# Altium schematic symbol library Capacitors.SchLib: 265 symbols (part 4 of 4)
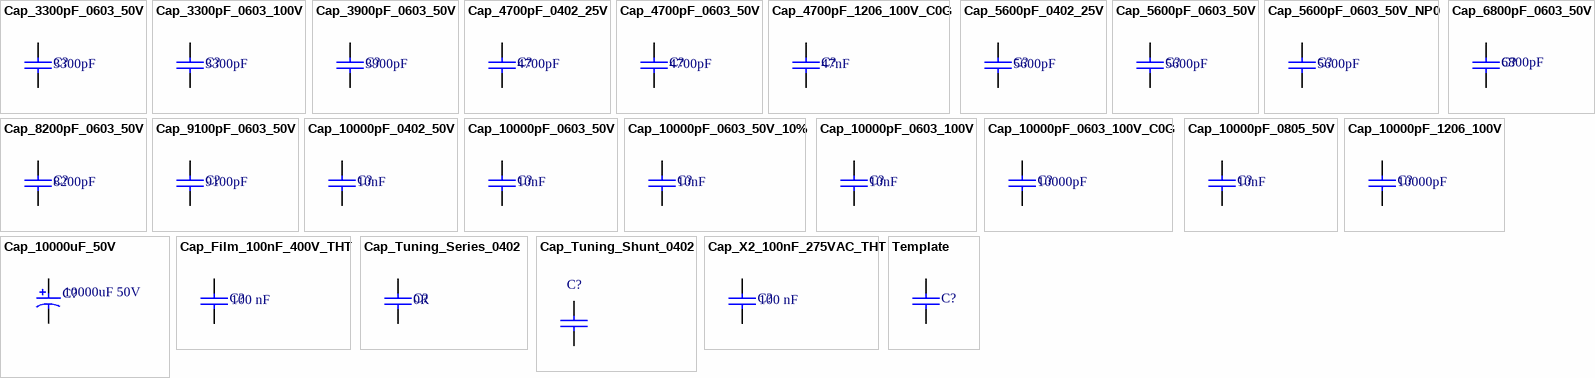
[diagram p9: symbols Cap_3300pF_0603_50V to Template]

## Cap_Film_100nF_400V_THT
designator C?, comment value 100 nF  (hidden comment: Film Capacitor)
CAP FILM 100nF ±5% 400V TH; Manufacturer: KNSCHA; Manufacturer Part Number: MPP104J2G10NN22640; Supplier 1: LCSC; Supplier Part Number 1: C506840; Reel stock: N/A; Last modified by: C.A.Cuaspa; Last modified date: 20261114; ComponentLink1Description: LCSC; ComponentLink1URL: https://www.lcsc.com/es/product-detail/C506840.html?s_z=n_q_%2509C506840&globalKeyword=%2509C506840; ComponentLink2Description: DATASHEET; ComponentLink2URL: https://www.lcsc.com/datasheet/C506840.pdf?spm=wm.sxq.inf.ggs&lcsc_vid=E1IIVwACEVVZVVBSQVQNAlEEFgJXU1ReQQRXVQEERlQxVlNfQ1dXVlVQR1hfVDsOAxUeFF5JWBYZEEoKFBINSQcJGk4LFEsWBQ4KEgcSWgULEwUPG04tU1xfR1ZXSQwSGg0%3D
footprint Cap_Film_100nF_400V_THT (100 nF Film Capacitor)
pins: 1, 2

## Cap_Tuning_Series_0402
designator C?, comment value 0R  (hidden comment: 0R 1/16W)
RES SMD 0 OHM JUMPER 1/16W 0402; Manufacturer: Samsung Electro-Mechanics; Manufacturer Part Number: RC1005J000CS; ComponentLink1URL: https://www.digikey.com/products/en?keywords=1276-3480-1-ND; Supplier 1: Poshton; Supplier Part Number 1: RC0402FR-070RL; Reel stock: N/A; Last modified by: J.Jaramillo; Last modified date: 20240309; ComponentLink1Description: Digi-key
footprint 0402_RF
pins: 1, 2

## Cap_Tuning_Shunt_0402
designator C?  (no BOM)
Capacitor symbol for tuning network of Tx lines; Manufacturer: NA; Reel stock: RF tuning bag; Manufacturer Part Number: NA; Supplier 1: NA; Supplier Part Number 1: NA; Last modified by: J.Jaramillo; Last modified date: 20240309
footprint 0402_RF
pins: 1, 2

## Cap_X2_100nF_275VAC_THT
designator C?, comment value 100 nF  (hidden comment: X2 Safety Capacitor)
CAP SAFETY 100nF ±10% 275V 305V 310V TH; Manufacturer: KNSCHA; Manufacturer Part Number: MPX104K31C3KN15600; Supplier 1: LCSC; Supplier Part Number 1: C489079; Reel stock: N/A; Last modified by: C.A.Cuaspa; Last modified date: 20261114; ComponentLink1Description: LCSC; ComponentLink1URL: https://www.lcsc.com/es/product-detail/C489079.html?s_z=n_q_MPX104K31C3KN15600&spm=wm.fly.bg.0.xh&lcsc_vid=E1IIVwACEVVZVVBSQVQNAlEEFgJXU1ReQQRXVQEERlQxVlNfQ1dWXlFeTlhaVjsOAxUeFF5JWBYZEEoKFBINSQcJGk4LFEs%3D; ComponentLink2Description: DATASHEET; ComponentLink2URL: https://www.lcsc.com/datasheet/C489079.pdf?spm=wm.sxq.inf.ggs___wm.fly.bg.0.xh&lcsc_vid=E1IIVwACEVVZVVBSQVQNAlEEFgJXU1ReQQRXVQEERlQxVlNfQ1dWXlFeTlhaVjsOAxUeFF5JWBYZEEoKFBINSQcJGk4LFEs%3D
footprint Cap_X2_100nF_275VAC_THT (100 nF X2 Safety Capacitor)
pins: 1, 2

## Template
designator C?
Supplier 1: Digi-Key; Last modified date: 20240309
pins: 1, 2